# Altium footprint library ASSMANN_A-USB_2-A-E.PcbLib: 1 footprints
Each footprint in its own frame and in the unit in brackets; x right, y up, seen from the top. Pads: shape width x height; smd on the part's side, far side on the other; paste and mask are expansions set on the pad; w line width, h text height; cw(c..) or ccw(c..) is an arc to the next point about the centre after c.
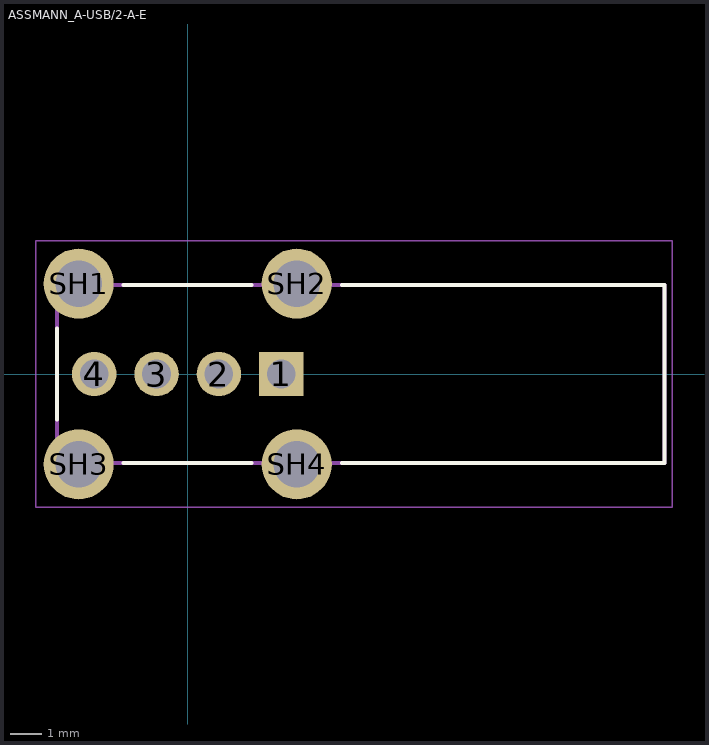
[diagram p0: the footprint, top view; thin cyan lines are the x and y axes]

## ASSMANN_A-USB/2-A-E [mm]
height 14
pads (8):
  rect 1.428x1.428 / inner round 1.428 / far side rect 1.428x1.428 hole 0.92: 1(3,0)
  round 1.428 hole 0.92: 2(1,0) 3(-1,0) 4(-3,0)
  round 2.25 hole 1.5: SH1(-3.5,2.9) SH2(3.5,2.9) SH3(-3.5,-2.9) SH4(3.5,-2.9)
Top Overlay:
  lines w0.127: -4.2,-1.455 -4.2,1.455 ; -2.055,-2.85 2.055,-2.85 ; -2.055,2.85 2.055,2.85 ; 4.945,-2.85 15.3,-2.85 15.3,2.85 4.945,2.85
Mechanical 13:
  lines w0.127: -4.2,-2.85 15.3,-2.85 15.3,2.85 -4.2,2.85 -4.2,-2.85
Mechanical 15:
  lines w0.05: -4.875,-4.275 -4.875,4.275 15.55,4.275 15.55,-4.275 -4.875,-4.275
3D body "step_temp.STEP": height 15.11, standoff -3.94, extent -4.11,-3.6 15.09,3.6